# Altium schematic symbol library PUSB3FR4Z.SchLib: 1 symbol
Pins are listed as number, name and electrical type; pins without a type are passive.

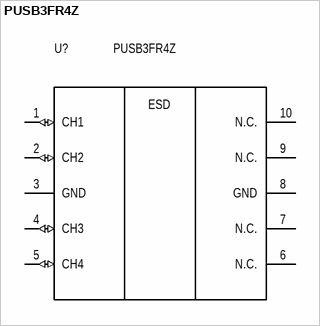
[diagram p0: symbol PUSB3FR4Z]

## PUSB3FR4Z
designator U?
Description; Manufacturer_Name: Nexperia; Copyright: Copyright (C) 2026 Ultra Librarian. All rights reserved.; Manufacturer_Part_Number: PUSB3FR4Z; RefDes: RefDes; Type: Type
footprint U_PUSB3FR4Z_NEX
pins: 1 CH1 (io), 2 CH2 (io), 3 GND (power), 4 CH3 (io), 5 CH4 (io), 6 N.C., 7 N.C., 8 GND (power), 9 N.C., 10 N.C.
text: ESD